# Altium integrated library C1206C475K5RACTU.IntLib: 1 symbol
Pins are listed as number, name and electrical type; pins without a type are passive.

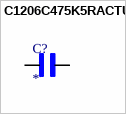
[diagram p0: symbol C1206C475K5RACTU]

## C1206C475K5RACTU
designator C?
4.7 ÂµF Â±10% 50V Ceramic Capacitor X7R 1206 (3216 Metric); MF: KEMET; MP: C1206C475K5RACTU; SnapEDA_Link: https://www.snapeda.com/parts/C1206C475K5RACTU/KEMET/view-part/?ref=snap; Package: 1206-2 KEMET; Value: *; Check_prices: https://www.snapeda.com/parts/C1206C475K5RACTU/KEMET/view-part/?ref=eda
footprint CAPC3216X110N
pins: 1, 2